# Altium schematic symbol library aeronist-Schematic-Lib.SchLib: 75 symbols (part 1 of 2)
Pins are listed as number, name and electrical type; pins without a type are passive.

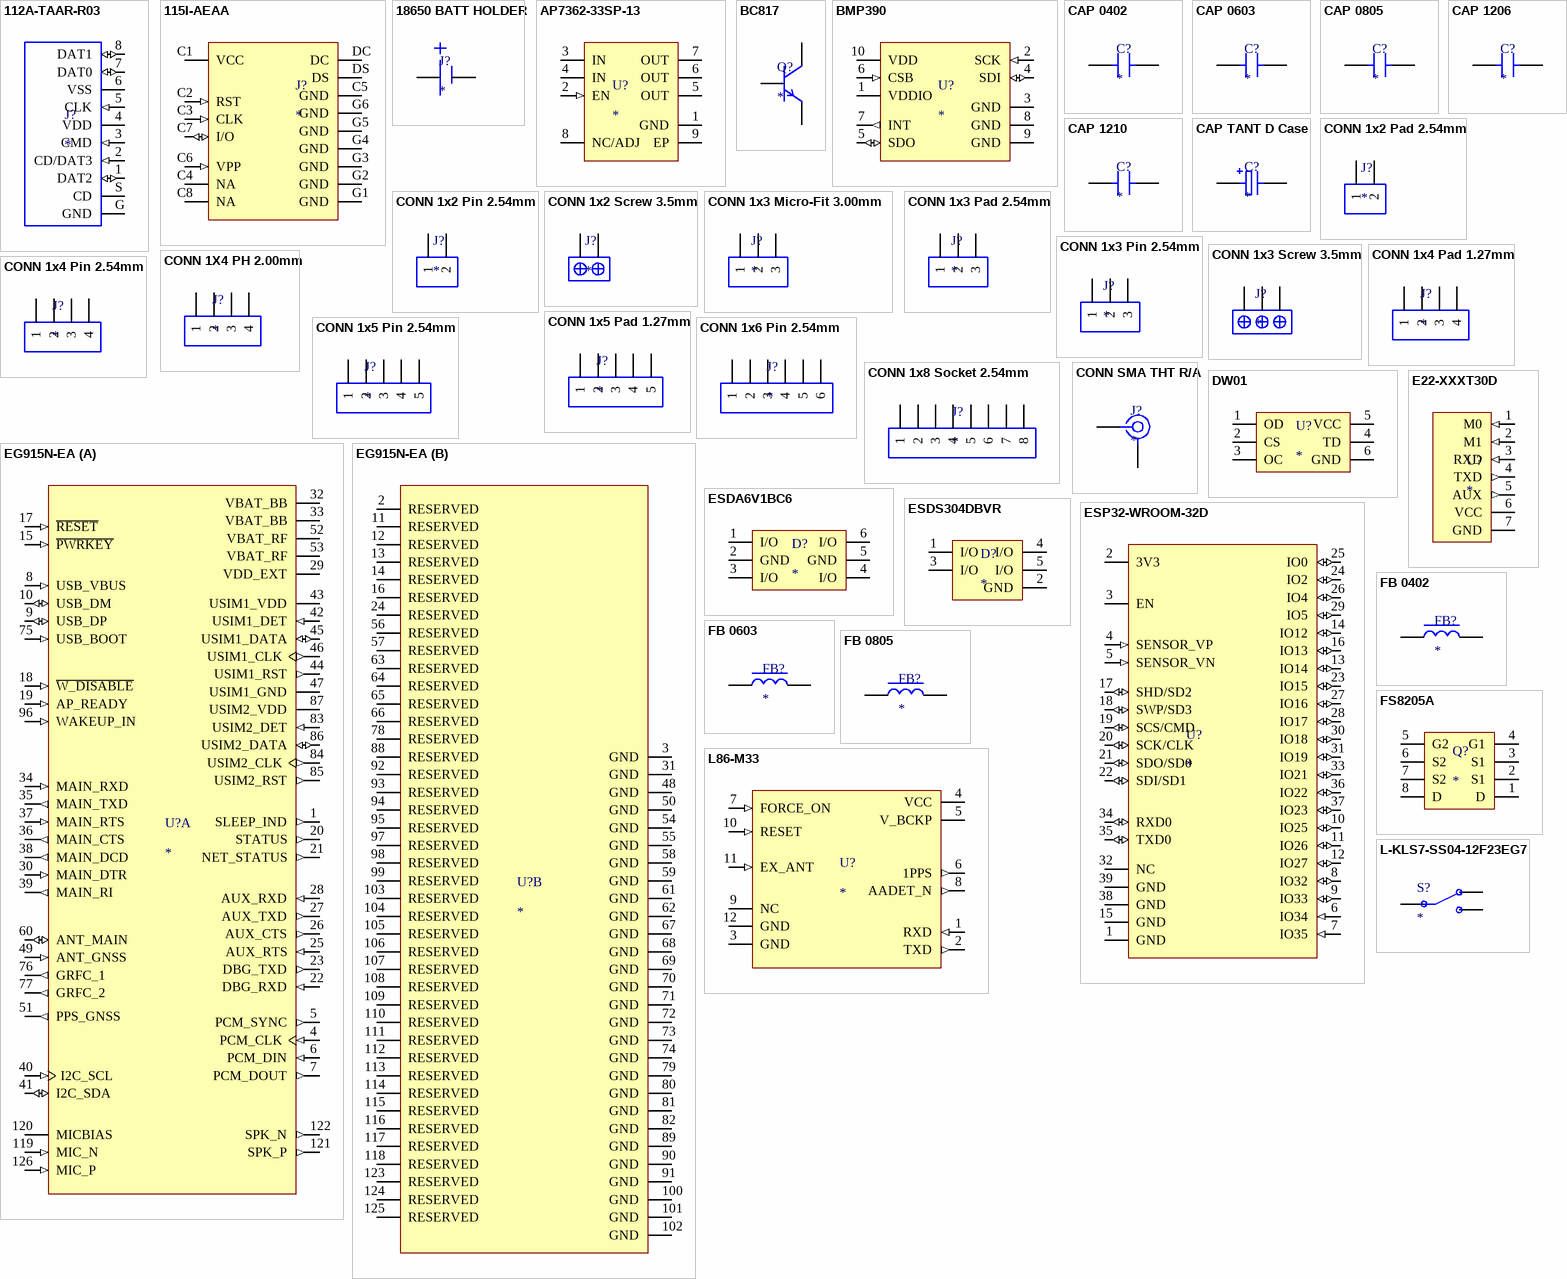
[diagram p0: symbols 112A-TAAR-R03 to L-KLS7-SS04-12F23EG7]

## 112A-TAAR-R03
designator J?
Connector, microSD push-push SMT, right-angle, with card detection switch.
footprint 112A-TAAR-R03 (Right-angle microSD SMT, 9 pins (8 data + detection), card eject switch, 1.83 mm height.)
pins: 1 DAT2 (io), 2 CD/DAT3 (in), 3 CMD (in), 4 VDD (power), 5 CLK (in), 6 VSS (power), 7 DAT0 (io), 8 DAT1 (io), G GND (power), S CD (power)

## 115I-AEAA
designator J?
115I-AEAA Connector Micro SIM Card Push-Pull 6P SMD Card Edge Connectors
footprint 115I-AEAA (6-pin right-angle SMD push-push Micro SIM card socket with gold-plated contacts)
pins: C1 VCC (power), C2 RST (in), C3 CLK (in), C4 NA, C5 GND (power), C6 VPP (in), C7 I/O (io), C8 NA, DC, DS, G1 GND (power), G2 GND (power), G3 GND (power), G4 GND (power), G5 GND (power), G6 GND (power)

## 18650 BATT HOLDER
designator J?
SMD battery holder contact snap-in clip  for unpolarized 18650 cell connection.
footprint 18650 BATT HOLDER (Footprint for 18650 Li-Ion battery holder snap-in contact, suitable for unpolarized 18650 cells.)
pins: N - (power), P + (power)

## AP7362-33SP-13
designator U?
Ldo, Fixed, 3.3V, 1.5A, -40 To 85Deg C Rohs Compliant: Yes |Diodes Inc. AP7362-33SP-13; Accuracy: 3.5%; Max Supply Voltage: 5.5V; Max Junction Temperature (Tj): 125°C; Min Input Voltage: 2.2V; Number of Channels: 1; Polarity: Positive; Quiescent Current: 25nA; Supplier: Avnet; Supplier Part Number: AP7362-33SP-13; Manufacturer: Diodes Inc.; Manufacturer Part Number: AP7362-33SP-13; RoHS: Compliant; Category: LDO Voltage Regulators; Stock: 157500; Pricing: 2500=0,13818, 5000=0,13748, 10000=0,13677, 15000=0,13607, 20000=0,13536 (USD); Case/Package: SOP; China RoHS: Compliant; Contact Plating: Tin; Height - Seated (Max): 1.75mm; Length: 4.9mm; Lifecycle Status: Production; Max Operating Temperature: 85°C; Max Output current: 1.5A; Min Operating Temperature: -40°C; Mounting Technology: Surface Mount; Number of Circuits: 1; Number of Outputs: 1; Pins: 8; Number of Regulators: 1; Number of Terminals: 8; Output Current: 1.5A; Output Type: Fixed; Output Voltage: 3.3V; REACH SVHC: Yes; Schedule B: 8542390000, 8542390000|8542390000|8542390000|8542390000|8542390000; Terminal Pitch: 1.27mm; Width: 3.9mm; ComponentLink1URL: https://datasheet.octopart.com:443/AP7362-33SP-13-Diodes-Inc.-datasheet-141402624.pdf?src-supplier=IHS; ComponentLink1Description: https://datasheet.octopart.com:443/AP7362-33SP-13-Diodes-Inc.-datasheet-141402624.pdf?src-supplier=IHS; ComponentLink2URL: https://datasheet.octopart.com:443/AP7362-33SP-13-Diodes-Inc.-datasheet-145012332.pdf?src-supplier=SHENGYU+ELECTRONICS; ComponentLink2Description: https://datasheet.octopart.com:443/AP7362-33SP-13-Diodes-Inc.-datasheet-145012332.pdf?src-supplier=SHENGYU+ELECTRONICS
footprint SOP-8EP (SOP-8EP, 8-Leads, Body 4,90x3,85mm, Pitch 1,27mm, Thermal Pad 3,35x2,71mm, IPC Low Density)
pins: 1 GND (power), 2 EN (in), 3 IN (power), 4 IN (power), 5 OUT (power), 6 OUT (power), 7 OUT (power), 8 NC/ADJ, 9 EP

## BC817
designator Q?
Single Bipolar Transistor, NPN, 45 V, 500 mA, 345 mW, SOT-23 (TO-236AB), 3 Pins, Surface Mount; Manufacturer: Nexperia; Manufacturer Part Number: BC817-40,215; Manufacturer Lifecycle Status: RELEASED FOR SUPPLY; Collector Base Voltage (VCBO): 50V; Collector Emitter Breakdown Voltage: 45V; Collector Emitter Saturation Voltage: 700mV; Emitter Base Voltage (VEBO): 5V; hFE Min: 250; Max Collector Current: 500mA; Max Junction Temperature (Tj): 150°C; Max Power Dissipation: 250mW; Number of Elements: 1; Transition Frequency: 100MHz; Supplier: Farnell; Supplier Part Number: 2336780; RoHS: Compliant; Category: BJTs; Stock: 135000; Pricing: 3000=0,0333, 9000=0,0326 (EUR); Ambient Temperature Range High: 150°C; China RoHS: Compliant; Collector Emitter Voltage (VCEO): 45V; Contact Plating: Tin; Height: 1.1mm; Lifecycle Status: Production; Max Operating Temperature: 150°C; Min Operating Temperature: -65°C; Pins: 3; Number of Terminals: 3; Polarity: NPN; Power Dissipation: 250mW; REACH SVHC: Yes; Schedule B: 8541210080, 8541210080|8541210080, 8541210080|8541210080|8541210080, 8541210080|8541210080|8541210080|8541210080; ComponentLink1URL: https://sigma.octopart.com:443/138797052/technical_drawing/Nexperia-BC817-40%2C215.pdf?src-supplier=Upverter; ComponentLink1Description: https://sigma.octopart.com:443/138797052/technical_drawing/Nexperia-BC817-40%2C215.pdf?src-supplier=Upverter; ComponentLink2URL: https://datasheet.octopart.com:443/BC817-40%2C215-Nexperia-datasheet-83187975.pdf?src-supplier=Newark; ComponentLink2Description: https://datasheet.octopart.com:443/BC817-40%2C215-Nexperia-datasheet-83187975.pdf?src-supplier=Newark; ComponentLink3URL: https://datasheet.octopart.com:443/BC817-40%2C215-Nexperia-datasheet-8514921.pdf?src-supplier=Newark; ComponentLink3Description: https://datasheet.octopart.com:443/BC817-40%2C215-Nexperia-datasheet-8514921.pdf?src-supplier=Newark; ComponentLink4URL: https://datasheet.octopart.com:443/BC817-40%2C215-Nexperia-datasheet-108335331.pdf?src-supplier=Burklin+Elektronik; ComponentLink4Description: https://datasheet.octopart.com:443/BC817-40%2C215-Nexperia-datasheet-108335331.pdf?src-supplier=Burklin+Elektronik; ComponentLink5URL: https://datasheet.octopart.com:443/BC817-40%2C215-NXP-Semiconductors-datasheet-180936575.pdf?src-supplier=IHS; ComponentLink5Description: https://datasheet.octopart.com:443/BC817-40%2C215-NXP-Semiconductors-datasheet-180936575.pdf?src-supplier=IHS; ComponentLink6URL: https://datasheet.octopart.com:443/BC817-40%2C215-Nexperia-datasheet-78862085.pdf?src-supplier=Farnell; ComponentLink6Description: https://datasheet.octopart.com:443/BC817-40%2C215-Nexperia-datasheet-78862085.pdf?src-supplier=Farnell; ComponentLink7URL: https://datasheet.octopart.com:443/BC817-40.215-Philips-datasheet-118926.pdf?src-supplier=Farnell; ComponentLink7Description: https://datasheet.octopart.com:443/BC817-40.215-Philips-datasheet-118926.pdf?src-supplier=Farnell; ComponentLink8URL: https://datasheet.octopart.com:443/BC817-40.215-Philips-datasheet-88079.pdf?src-supplier=Farnell; ComponentLink8Description: https://datasheet.octopart.com:443/BC817-40.215-Philips-datasheet-88079.pdf?src-supplier=Farnell; ComponentLink9URL: https://datasheet.octopart.com:443/BC817-40.215-Philips-datasheet-128977.pdf?src-supplier=Farnell; ComponentLink9Description: https://datasheet.octopart.com:443/BC817-40.215-Philips-datasheet-128977.pdf?src-supplier=Farnell; ComponentLink10URL: https://datasheet.octopart.com:443/BC817-40.215-Philips-datasheet-29749.pdf?src-supplier=Future+Electronics; ComponentLink10Description: https://datasheet.octopart.com:443/BC817-40.215-Philips-datasheet-29749.pdf?src-supplier=Future+Electronics; ComponentLink11URL: https://datasheet.octopart.com:443/BC817-40.215-Philips-datasheet-10632440.pdf?src-supplier=element14+APAC; ComponentLink11Description: https://datasheet.octopart.com:443/BC817-40.215-Philips-datasheet-10632440.pdf?src-supplier=element14+APAC; ComponentLink12URL: https://datasheet.octopart.com:443/BC817-40%2C215-Philips-datasheet-14064526.pdf?src-supplier=iiiC; ComponentLink12Description: https://datasheet.octopart.com:443/BC817-40%2C215-Philips-datasheet-14064526.pdf?src-supplier=iiiC; ComponentLink13URL: http://sigma.octopart.com:80/rohs_statement/NXP-Semiconductors-company-12.pdf?src-supplier=Compliance+Statements; ComponentLink13Description: http://sigma.octopart.com:80/rohs_statement/NXP-Semiconductors-company-12.pdf?src-supplier=Compliance+Statements; ComponentLink14URL: http://sigma.octopart.com:80/reach_statement/NXP-Semiconductors-company-13.pdf?src-supplier=Compliance+Statements; ComponentLink14Description: http://sigma.octopart.com:80/reach_statement/NXP-Semiconductors-company-13.pdf?src-supplier=Compliance+Statements
footprint SOT23-3 (SOT23, 3-Leads, Body 2,90x2,30mm, Pitch 0,95mm, IPC Low Density)
pins: 1 B, 2 E, 3 C

## BMP390
designator U?
Pressure sensor, 300-1250hPa, 2.0*2.0*0.75mm, I2C/SPI; Manufacturer: Bosch Sensortec; Manufacturer Part Number: BMP390; Supplier: Future Electronics; Supplier Part Number: 3151950; RoHS: Compliant; Category: Pressure Sensors; Stock: 106; Pricing: 1=3,29, 20=3,01, 150=2,83, 1000=2,65, 5000=2,5 (USD); ComponentLink1URL: https://datasheet.octopart.com:443/BMP390-Bosch-Sensortec-datasheet-164327956.pdf?src-supplier=Future+Electronics; ComponentLink1Description: https://datasheet.octopart.com:443/BMP390-Bosch-Sensortec-datasheet-164327956.pdf?src-supplier=Future+Electronics
footprint BMP390 (LGA-10 footprint for Bosch BMP390 barometric pressure sensor, 2.0 × 2.0 × 0.75 mm package, 0.5 mm pitch)
pins: 1 VDDIO (power), 2 SCK (in), 3 GND (power), 4 SDI (io), 5 SDO (io), 6 CSB (in), 7 INT (out), 8 GND (power), 9 GND (power), 10 VDD (power)

## CAP 0402
designator C?
Capacitor SMD 0402
footprint CAP 0402 (Chip Capacitor, 2-Leads, Body 2,00x1,25mm, IPC Low Density)
pins: 1, 2

## CAP 0603
designator C?
Capacitor SMD 0603
footprint CAP 0603 (Chip Capacitor, 2-Leads, Body 1,60x0,80mm, IPC Low Density)
pins: 1, 2

## CAP 0805
designator C?
Capacitor SMD 0805
footprint CAP 0805 (Chip Capacitor, 2-Leads, Body 2,00x1,25mm, IPC Low Density)
pins: 1, 2

## CAP 1206
designator C?
Capacitor SMD 0603
footprint CAP 1206 (Chip Capacitor, 2-Leads, Body 3,20x1,60mm, IPC Low Density)
pins: 1, 2

## CAP 1210
designator C?
Capacitor SMD 1210
footprint CAP 1210 (Chip Capacitor, 2-Leads, Body 3,20x2,50mm, IPC Low Density)
pins: 1, 2

## CAP TANT D Case
designator C?
Capacitor Tantalum SMD D Case
footprint CAP TANT D Case
pins: 1, 2

## CONN 1x2 Pad 2.54mm
designator J?
1×2 pad connector, 2.54 mm pitch.
footprint CONN 1x2 PAD 2.54mm (1×2 pad connector, 2.54 mm pitch.)
pins: 1, 2

## CONN 1x2 Pin 2.54mm
designator J?
1×2 pin header connector, 2.54 mm pitch, through-hole.
footprint CONN 1x2 PIN 2.54mm (1×2 pin header connector, 2.54 mm pitch, through-hole.)
pins: 1, 2

## CONN 1x2 Screw 3.5mm
designator J?
1×2 screw terminal connector, 3.5 mm pitch, through-hole.
footprint CONN 1X2 SCREW 3.5MM (1×2 screw terminal connector, 3.5 mm pitch, through-hole.)
pins: 1, 2

## CONN 1x3 Micro-Fit 3.00mm
designator J?
1×2 Micro Fit type connector, 3.0 mm pitch, surface-mount.
footprint CONN 1X3 MICRO-FIT 3.00MM
pins: 1, 2, 3

## CONN 1x3 Pad 2.54mm
designator J?
1×3 pad connector, 2.54 mm pitch.
footprint CONN 1x3 PAD 2.54mm (1×3 pad connector, 2.54 mm pitch.)
pins: 1, 2, 3

## CONN 1x3 Pin 2.54mm
designator J?
1×3 pin header connector, 2.54 mm pitch, through-hole.
footprint CONN 1x3 PIN 2.54mm (1×3 pin header connector, 2.54 mm pitch, through-hole.)
pins: 1, 2, 3

## CONN 1x3 Screw 3.5mm
designator J?
1×3 screw terminal connector, 3.5 mm pitch, through-hole.
footprint CONN 1X3 SCREW 3.5MM (1×3 screw terminal connector, 3.5 mm pitch, through-hole.)
pins: 1, 2, 3

## CONN 1x4 Pad 1.27mm
designator J?
1×4 pin header connector, 1.27 mm pitch.
footprint CONN 1x4 PAD 1.27mm (1×4 pad connector, 1.27 mm pitch.)
pins: 1, 2, 3, 4

## CONN 1X4 PH 2.00mm
designator J?
Connector Header, PH Series, 4 Position, Side Entry, 2.00mm, Solder, Surface Mount, Natural.; Manufacturer: JST; Manufacturer Part Number: S4B-PH-SM4-TB(LF)(SN); Connector Type: Male Pin; Contact Resistance: 20mΩ; Current Rating: 2A; Dielectric Material: Polyamide; Gender: Male; Insulation Resistance: 1GΩ; Max Voltage Rating (AC): 100V; Number of Contacts: 4; Pitch: 2mm; Supplier: Future Electronics; Supplier Part Number: 1769371; RoHS: Compliant; Category: Headers and Wire Housings; Stock: 5000; Pricing: 1000=0,32, 3000=0,315, 5000=0,31 (USD); China RoHS: Compliant; Color: White; Contact Gender: Male; Contact Material: Tin; Contact Mating Length: 3.302mm; Contact Plating: Tin; Depth: 7.6mm; Fastening Type: Detent; Flammability Rating: UL94 V-0; Height: 5.5mm; Housing Color: Natural; Housing Material: Nylon; Lead Free: Lead Free; Lead Pitch: 2mm; Length: 6.096mm; Lifecycle Status: Production; Max Current Rating: 2A; Max Operating Temperature: 85°C; Max Voltage Rating (DC): 100V; Min Operating Temperature: -25°C; Mounting Technology: Surface Mount; Pins: 4; Number of Poles: 4; Number of Positions: 4; Number of Rows: 1; Packaging: Cut Tape; REACH SVHC: Yes; Schedule B: 8536694040; Terminal Pitch: 2mm; Termination: Solder; Voltage Rating: 100V; Voltage Rating (AC): 100V; Voltage Rating (DC): 100V; Weight: 28.349523g; Width: 5mm; Working Voltage: 100V; ComponentLink1URL: https://datasheet.octopart.com:443/S4B-PH-SM4-TB%28LF%29%28SN%29-JST-datasheet-147762421.pdf?src-supplier=Upverter; ComponentLink1Description: https://datasheet.octopart.com:443/S4B-PH-SM4-TB%28LF%29%28SN%29-JST-datasheet-147762421.pdf?src-supplier=Upverter; ComponentLink2URL: https://datasheet.octopart.com:443/S4B-PH-SM4-TB%28LF%29%28SN%29-JST-datasheet-10411123.pdf?src-supplier=Upverter; ComponentLink2Description: https://datasheet.octopart.com:443/S4B-PH-SM4-TB%28LF%29%28SN%29-JST-datasheet-10411123.pdf?src-supplier=Upverter; ComponentLink3URL: https://datasheet.octopart.com:443/S4B-PH-SM4-TB%28LF%29%28SN%29-JST-datasheet-8324864.pdf?src-supplier=Upverter; ComponentLink3Description: https://datasheet.octopart.com:443/S4B-PH-SM4-TB%28LF%29%28SN%29-JST-datasheet-8324864.pdf?src-supplier=Upverter; ComponentLink4URL: https://datasheet.octopart.com:443/S4B-PH-SM4-TB%28LF%29%28SN%29-JST-datasheet-180491729.pdf?src-supplier=IHS; ComponentLink4Description: https://datasheet.octopart.com:443/S4B-PH-SM4-TB%28LF%29%28SN%29-JST-datasheet-180491729.pdf?src-supplier=IHS; ComponentLink5URL: https://datasheet.octopart.com:443/S4B-PH-SM4-TB%28LF%29%28SN%29-JST-datasheet-15068535.pdf?src-supplier=SOS+electronic; ComponentLink5Description: https://datasheet.octopart.com:443/S4B-PH-SM4-TB%28LF%29%28SN%29-JST-datasheet-15068535.pdf?src-supplier=SOS+electronic; ComponentLink6URL: https://datasheet.octopart.com:443/S4B-PH-SM4-TB-%28LF%29%28SN%29-JST-datasheet-165061721.pdf?src-supplier=Burklin+Elektronik; ComponentLink6Description: https://datasheet.octopart.com:443/S4B-PH-SM4-TB-%28LF%29%28SN%29-JST-datasheet-165061721.pdf?src-supplier=Burklin+Elektronik; ComponentLink7URL: https://datasheet.octopart.com:443/S4B-PH-SM4-TB-%28LF%29%28SN%29-JST-datasheet-12510261.pdf?src-supplier=TME; ComponentLink7Description: https://datasheet.octopart.com:443/S4B-PH-SM4-TB-%28LF%29%28SN%29-JST-datasheet-12510261.pdf?src-supplier=TME; ComponentLink8URL: https://datasheet.octopart.com:443/S4B-PH-SM4-TB%28LF%29%28SN%29-JST-datasheet-56537.pdf?src-supplier=DigiKey; ComponentLink8Description: https://datasheet.octopart.com:443/S4B-PH-SM4-TB%28LF%29%28SN%29-JST-datasheet-56537.pdf?src-supplier=DigiKey; ComponentLink9URL: https://datasheet.octopart.com:443/S4B-PH-SM4-TB-%28LF%29-%28SN%29-JST-datasheet-159515011.pdf?src-supplier=Amar+Radio+Corporation; ComponentLink9Description: https://datasheet.octopart.com:443/S4B-PH-SM4-TB-%28LF%29-%28SN%29-JST-datasheet-159515011.pdf?src-supplier=Amar+Radio+Corporation
footprint CONN 1X4 PH 2.00MM (Connector Header, Surface Mount (SMT), Right Angle (Side Entry), 4 Positions, 2.00mm Pitch, JST PH Series)
pins: 1, 2, 3, 4

## CONN 1x4 Pin 2.54mm
designator J?
1×4 pin header connector, 2.54 mm pitch, through-hole.
footprint CONN 1x4 PIN 2.54mm (1×4 pin header connector, 2.54 mm pitch, through-hole.)
pins: 1, 2, 3, 4

## CONN 1x5 Pad 1.27mm
designator J?
1×5 pin header connector, 1.27 mm pitch.
footprint CONN 1x5 PAD 1.27mm (1×3 pad connector, 1.27 mm pitch.)
pins: 1, 2, 3, 4, 5

## CONN 1x5 Pin 2.54mm
designator J?
1×5 pin header connector, 2.54 mm pitch, through-hole.
footprint CONN 1x5 PIN 2.54mm (1×5 pin header connector, 2.54 mm pitch, through-hole.)
pins: 1, 2, 3, 4, 5

## CONN 1x6 Pin 2.54mm
designator J?
1×6 pin header connector, 2.54 mm pitch, through-hole.
footprint CONN 1x6 PIN 2.54mm (1×6 pin header connector, 2.54 mm pitch, through-hole.)
pins: 1, 2, 3, 4, 5, 6

## CONN 1x8 Socket 2.54mm
designator J?
1×8 pin header connector, 2.54 mm pitch, through-hole.
footprint CONN 1x8 SOCKET 2.54mm (1×8 female pin header, 2.54 mm pitch, through-hole.)
pins: 1, 2, 3, 4, 5, 6, 7, 8

## CONN SMA THT R/A
designator J?
RF SMA Connector, 1 Contact(s), Board Mount, R/A
footprint CONN SMA THT R/A (Through-hole PCB footprint for right-angle SMA connector)
pins: 1, 2 (power)

## DW01
designator U?
Li-Ion battery protection IC DW01 providing overcharge, overdischarge, and overcurrent protection.
footprint SOT-23-6 (SOP-8, 8-Leads, Body 4.90x3.90mm, Pitch 1.27mm, IPC Low Density.)
pins: 1 OD, 2 CS, 3 OC, 4 TD, 5 VCC (power), 6 GND (power)

## E22-XXXT30D
designator U?
E22-XXXT30D LoRa RF module, 400/900 MHz, 30 dBm TX power, UART interface, 3.3–5.5 V supply.
footprint E22-XXXT30D (Through-hole PCB footprint for E22 series LoRa RF modules)
pins: 1 M0 (in), 2 M1 (in), 3 RXD (in), 4 TXD (out), 5 AUX (out), 6 VCC (power), 7 GND (power)

## EG915N-EA
designator U?
Cellular, Navigation BeiDou, EDGE, Galileo, GLONASS, GNSS, GPRS, GPS, GSM, HSPA+, LTE, UMTS, WCDMA Transceiver Module 915MHz Antenna Not Included Surface Mount; MF: Quectel; MP: EG915NEAAC-N05-SNNSA; SnapEDA_Link: https://www.snapeda.com/parts/EG915NEAAC-N05-SNNSA/Quectel/view-part/?ref=snap; Package: None; Value: *; Check_prices: https://www.snapeda.com/parts/EG915NEAAC-N05-SNNSA/Quectel/view-part/?ref=eda
footprint EG915N (LGA-126 footprint for Quectel EG915N series, 1.1 mm pitch, 33 × 29)
part A pins: 1 SLEEP_IND (out), 4 PCM_CLK (in), 5 PCM_SYNC (out), 6 PCM_DIN (in), 7 PCM_DOUT (out), 8 USB_VBUS (in), 9 USB_DP (io), 10 USB_DM (io), 15 ~{PWRKEY} (in), 17 ~{RESET} (in), 18 ~{W_DISABLE} (in), 19 AP_READY (in), 20 STATUS (out), 21 NET_STATUS (out), 22 DBG_RXD (in), 23 DBG_TXD (out), 25 AUX_RTS (in), 26 AUX_CTS (out), 27 AUX_TXD (out), 28 AUX_RXD (in), 29 VDD_EXT (power), 30 MAIN_DTR (in), 32 VBAT_BB (power), 33 VBAT_BB (power), 34 MAIN_RXD (in), 35 MAIN_TXD (out), 36 MAIN_CTS (out), 37 MAIN_RTS (in), 38 MAIN_DCD (out), 39 MAIN_RI (out), 40 I2C_SCL (in), 41 I2C_SDA (io), 42 USIM1_DET (in), 43 USIM1_VDD (power), 44 USIM1_RST (out), 45 USIM1_DATA (io), 46 USIM1_CLK (out), 47 USIM1_GND (power), 49 ANT_GNSS (in), 51 PPS_GNSS (out), 52 VBAT_RF (power), 53 VBAT_RF (power), 60 ANT_MAIN (io), 75 USB_BOOT (in), 76 GRFC_1 (out), 77 GRFC_2 (out), 83 USIM2_DET (in), 84 USIM2_CLK (out), 85 USIM2_RST (out), 86 USIM2_DATA (io), 87 USIM2_VDD (power), 96 WAKEUP_IN (in), 119 MIC_N (in), 120 MICBIAS (power), 121 SPK_P (out), 122 SPK_N (out), 126 MIC_P (in)
part B pins: 2 RESERVED, 3 GND (power), 11 RESERVED, 12 RESERVED, 13 RESERVED, 14 RESERVED, 16 RESERVED, 24 RESERVED, 31 GND (power), 48 GND (power), 50 GND (power), 54 GND (power), 55 GND (power), 56 RESERVED, 57 RESERVED, 58 GND (power), 59 GND (power), 61 GND (power), 62 GND (power), 63 RESERVED, 64 RESERVED, 65 RESERVED, 66 RESERVED, 67 GND (power), 68 GND (power), 69 GND (power), 70 GND (power), 71 GND (power), 72 GND (power), 73 GND (power), 74 GND (power), 78 RESERVED, 79 GND (power), 80 GND (power), 81 GND (power), 82 GND (power), 88 RESERVED, 89 GND (power), 90 GND (power), 91 GND (power), 92 RESERVED, 93 RESERVED, 94 RESERVED, 95 RESERVED, 97 RESERVED, 98 RESERVED, 99 RESERVED, 100 GND (power), 101 GND (power), 102 GND (power), 103 RESERVED, 104 RESERVED, 105 RESERVED, 106 RESERVED, 107 RESERVED, 108 RESERVED, 109 RESERVED, 110 RESERVED, 111 RESERVED, 112 RESERVED, 113 RESERVED, 114 RESERVED, 115 RESERVED, 116 RESERVED, 117 RESERVED, 118 RESERVED, 123 RESERVED, 124 RESERVED, 125 RESERVED

## ESDA6V1BC6
designator D?
ESDA Series 4 Channel 6.1 V 20 pF SMT Bi-Directional Transil Array - SOT-23-6L; Manufacturer: STMicroelectronics; Manufacturer Part Number: ESDA6V1BC6; Breakdown Voltage: 7.05V; Value: 20pF; Clamping Voltage: 11.35V; Direction: Bidirectional; ESD Protection: Yes; Leakage Current: 1µA; Max Breakdown Voltage: 8V; Max Junction Temperature (Tj): 150°C; Max Power Dissipation: 80W; Max Repetitive Reverse Voltage (Vrrm): 5V; Min Breakdown Voltage: 6.1V; Number of Bidirectional Channels: 4; Peak Pulse Current: 3A; Power Line Protection: No; Test Current: 1mA; Supplier: Farnell; Supplier Part Number: 2353644; RoHS: Compliant; Category: TVS Diodes; Stock: 66279; Pricing: 5=0,368, 50=0,194, 100=0,179, 500=0,163, 1500=0,148 (EUR); Case/Package: SOT-23; China RoHS: Compliant; Composition: Zener; Depth: 1.75mm; Height: 1.45mm; Lead Free: Lead Free; Length: 3.05mm; Lifecycle Status: Production; Max Operating Temperature: 150°C; Max Reverse Leakage Current: 1µA; Min Operating Temperature: -40°C; Mounting Technology: Surface Mount; Number of Channels: 4; Number of Elements: 4; Pins: 6; Number of Terminals: 6; Operating Supply Voltage: 5V; Peak Pulse Power: 80W; Peak Reverse Current: 1µA; Polarity: Bidirectional; Power Rating: 80W; Radiation Hardening: No; REACH SVHC: Yes; Reverse Breakdown Voltage: 6.1V; Reverse Standoff Voltage: 5V; Schedule B: 8536300000, 8536300000|8536300000|8536300000|8536300000|8536300000; Termination: SMD/SMT; Voltage Rating (DC): 6.1V; Width: 1.75mm; Working Voltage: 5V; ComponentLink1URL: https://datasheet.octopart.com:443/ESDA6V1BC6-STMicroelectronics-datasheet-62332559.pdf?src-supplier=TME; ComponentLink1Description: https://datasheet.octopart.com:443/ESDA6V1BC6-STMicroelectronics-datasheet-62332559.pdf?src-supplier=TME; ComponentLink2URL: https://datasheet.octopart.com:443/ESDA6V1BC6-STMicroelectronics-datasheet-23376.pdf?src-supplier=Components+Direct; ComponentLink2Description: https://datasheet.octopart.com:443/ESDA6V1BC6-STMicroelectronics-datasheet-23376.pdf?src-supplier=Components+Direct; ComponentLink3URL: https://datasheet.octopart.com:443/ESDA6V1BC6-STMicroelectronics-datasheet-158727008.pdf?src-supplier=Newchip+Electronics+Limited; ComponentLink3Description: https://datasheet.octopart.com:443/ESDA6V1BC6-STMicroelectronics-datasheet-158727008.pdf?src-supplier=Newchip+Electronics+Limited; ComponentLink4URL: https://datasheet.octopart.com:443/ESDA6V1BC6-STMicroelectronics-datasheet-14049101.pdf?src-supplier=iiiC; ComponentLink4Description: https://datasheet.octopart.com:443/ESDA6V1BC6-STMicroelectronics-datasheet-14049101.pdf?src-supplier=iiiC
footprint SOT-23-6 (SOP-8, 8-Leads, Body 4.90x3.90mm, Pitch 1.27mm, IPC Low Density.)
pins: 1 I/O, 2 GND, 3 I/O, 4 I/O, 5 GND, 6 I/O

## ESDS304DBVR
designator D?
Trans Voltage Suppressor Diode, 85W, 3.6V V(RWM), Unidirectional, 4 Element, Silicon; Manufacturer: Texas Instruments; Manufacturer Part Number: ESDS304DBVR; Supplier: Mouser; Supplier Part Number: 595-ESDS304DBVR; RoHS: Yes; Category: TVS Diodes; Stock: 132; Pricing: 1=0,45, 10=0,304, 50=0,304, 100=0,282, 1000=0,202, 10000=0,15 (USD); Terminal Finish: Tin; JESD-609 Code: e3; Diode Type: TRANS VOLTAGE SUPPRESSOR; Moisture Sensitivity Level: 1; Reach SVHC Compliant: Yes; RoHS Compliant: Yes; ComponentLink1URL: https://www.ti.com:443/lit/ds/symlink/esds302.pdf?src-supplier=IHS+Markit; ComponentLink1Description: https://www.ti.com:443/lit/ds/symlink/esds302.pdf?src-supplier=IHS+Markit; ComponentLink2URL: http://www.ti.com/lit/ds/symlink/esds302.pdf?src-supplier=Digikey; ComponentLink2Description: http://www.ti.com/lit/ds/symlink/esds302.pdf?src-supplier=Digikey
footprint SOT23-5 (SOT23, 5-Leads, Body 2,90x2,80mm, Pitch 0,95mm, IPC Low Density)
pins: 1 I/O, 2 GND, 3 I/O, 4 I/O, 5 I/O

## ESP32-WROOM-32D
designator U?
Dual-core Wi-Fi + Bluetooth module with 4 MB flash. 2.4 GHz connectivity, 34 GPIOs, UART/SPI/I²C, ADC/DAC, 3.3 V supply; Manufacturer: Espressif Systems; Manufacturer Part Number: ESP32-WROOM-32D(4MB); Supplier: Mouser; Supplier Part Number: 356-ESP32WROOM32D4MB; RoHS: No; Category: LDO
footprint ESP32-WROOM-32 (Module size: 18.0 × 25.5 × 3.1 mm. Pin pitch: 1.27 mm, 38 castellated pads. Antenna keepout zone required (minimum 15 mm clearance).)
pins: 1 GND (power), 2 3V3 (power), 3 EN, 4 SENSOR_VP (in), 5 SENSOR_VN (in), 6 IO34 (in), 7 IO35 (in), 8 IO32 (io), 9 IO33 (io), 10 IO25 (io), 11 IO26 (io), 12 IO27 (io), 13 IO14 (io), 14 IO12 (io), 15 GND (power), 16 IO13 (io), 17 SHD/SD2 (io), 18 SWP/SD3 (io), 19 SCS/CMD (io), 20 SCK/CLK (io), 21 SDO/SD0 (io), 22 SDI/SD1 (io), 23 IO15 (io), 24 IO2 (io), 25 IO0 (io), 26 IO4 (io), 27 IO16 (io), 28 IO17 (io), 29 IO5 (io), 30 IO18 (io), 31 IO19 (io), 32 NC, 33 IO21 (io), 34 RXD0 (io), 35 TXD0 (io), 36 IO22 (io), 37 IO23 (io), 38 GND (power), 39 GND (power)

## FB 0402
designator FB?
Ferrite Bead SMD 0402
footprint FB 0402 (Chip Ferrite, 2-Leads, Body 1,00x0,50mm, IPC Low Density)
pins: 1, 2

## FB 0603
designator FB?
Ferrite Bead SMD 0603
footprint FB 0603 (Chip Ferrite, 2-Leads, Body 1,60x0,80mm, IPC Low Density)
pins: 1, 2

## FB 0805
designator FB?
Ferrite Bead SMD 0805
footprint FB 0805 (Chip Ferrite, 2-Leads, Body 2,00x1,25mm, IPC Low Density)
pins: 1, 2

## FS8205A
designator Q?
Dual N-channel MOSFET IC (FS8205A) with integrated back-to-back configuration for load switching and protection applications.
footprint TSSOP-8 (TSSOP, 8-Leads, Body 2,93x4,40mm, Pitch 0,65mm, IPC Low Density)
pins: 1 D, 2 S1, 3 S1, 4 G1, 5 G2, 6 S2, 7 S2, 8 D

## L86-M33
designator U?
GNSS Module, Galileo, GLONASS, GPS, QZSS, 1.57542GHz, 1.60171GHz, -167 dBm, 35 s, 3V to 4.3V; Manufacturer: Quectel; Manufacturer Part Number: L86-M33; Number of Circuits: 1; Operating Supply Voltage: 3.3V; Supplier: Mouser; Supplier Part Number: 277-L86-M33; RoHS: Compliant; Category: RF Transceiver Modules and Modems; Stock: 1427; Pricing: 1=12,82, 10=11,15, 50=10,56, 100=9,77, 1000=8,75, 10000=8,75 (USD); Height - Seated (Max): 7.15mm; Length: 18.4mm; Max Operating Temperature: 85°C; Min Operating Temperature: -40°C; Number of Terminals: 12; REACH SVHC: Yes; Width: 18.4mm; ComponentLink1URL: https://datasheet.octopart.com:443/L86-M33-Quectel-datasheet-181153375.pdf?src-supplier=IHS; ComponentLink1Description: https://datasheet.octopart.com:443/L86-M33-Quectel-datasheet-181153375.pdf?src-supplier=IHS; ComponentLink2URL: https://datasheet.octopart.com:443/L86-M33-Quectel-datasheet-163887215.pdf?src-supplier=SOS+electronic; ComponentLink2Description: https://datasheet.octopart.com:443/L86-M33-Quectel-datasheet-163887215.pdf?src-supplier=SOS+electronic; ComponentLink3URL: https://datasheet.octopart.com/L86-M33-Quectel-datasheet-77840748.pdf; ComponentLink3Description: https://datasheet.octopart.com/L86-M33-Quectel-datasheet-77840748.pdf
footprint L86-M33 (Footprint for Quectel L86-M33 GNSS module, 16 × 16 mm outline, 1.1 mm pad pitch, castellated edge pad)
pins: 1 RXD (in), 2 TXD (out), 3 GND (power), 4 VCC (power), 5 V_BCKP (power), 6 1PPS (out), 7 FORCE_ON (in), 8 AADET_N (out), 9 NC, 10 RESET (in), 11 EX_ANT (in), 12 GND (power)

## L-KLS7-SS04-12F23EG7
designator S?
On-On slide switch SPDT, through-hole, right angle.
footprint L-KLS7-SS04-12F23EG7 (Slide switch SPDT (ON-ON), through-hole, 3 pins, right-angle type.)
pins: 1 NC, 2 C, 3 NO

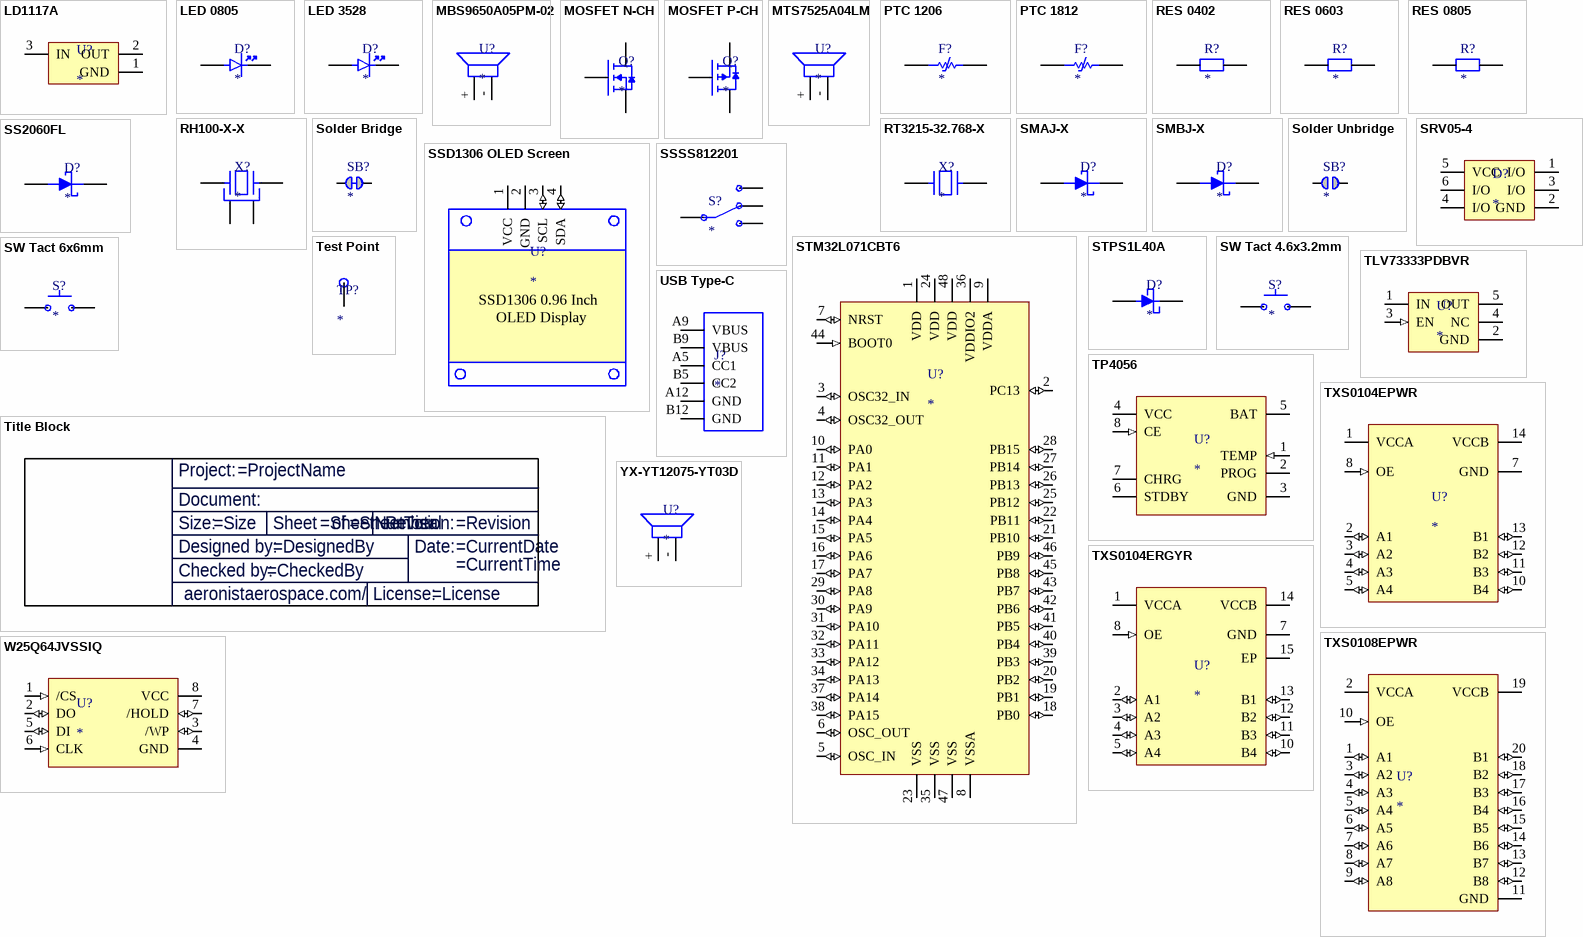
[diagram p1: symbols LD1117A to YX-YT12075-YT03D]

## LD1117A
designator U?
LD1117A Series 1 A Fixed Output Positive Voltage LDO Regulator - SOT-223; Manufacturer: STMicroelectronics; Manufacturer Part Number: LD1117AS33TR; Accuracy: 2%; Dropout Voltage: 1.15V; Input Bias Current: 5mA; Max Supply Voltage: 10V; Max Junction Temperature (Tj): 125°C; Max Output current: 1.2A; Max Power Dissipation: 12W; Min Input Voltage: 4.75V; Min Output Voltage: 3.3V; Number of Channels: 1; Output Current: 1A; Supplier: Farnell; Supplier Part Number: 1467776; RoHS: Compliant; Category: LDO Voltage Regulators; Stock: 25047; Pricing: 5=0,647, 50=0,41, 100=0,358, 500=0,318, 1000=0,307 (EUR); Case/Package: SOT-223; China RoHS: Compliant; Contact Plating: Tin; Height: 1.8mm; Height - Seated (Max): 1.9mm; Lead Free: Lead Free; Length: 6.5mm; Lifecycle Status: Production; Max Operating Temperature: 125°C; Min Operating Temperature: 0°C; Mounting Technology: Surface Mount; Nominal Output Voltage: 3.3V; Number of Circuits: 1; Number of Outputs: 1; Number of Regulators: 1; Number of Terminals: 4; Output Type: Fixed; Output Voltage: 3.3V; Output Voltage Accuracy: 2%; Packaging: Tape and Reel; Polarity: Positive; Power Dissipation: 12W; Quiescent Current: 5mA; Radiation Hardening: No; REACH SVHC: Yes; Schedule B: 8542390000, 8542390000|8542390000|8542390000|8542390000|8542390000; Terminal Pitch: 2.3mm; Voltage Tolerance: 2%; Weight: 4.535924g; Width: 3.5mm; ComponentLink1URL: https://datasheet.octopart.com:443/LD1117AS33TR-STMicroelectronics-datasheet-20828903.pdf?src-supplier=Augswan; ComponentLink1Description: https://datasheet.octopart.com:443/LD1117AS33TR-STMicroelectronics-datasheet-20828903.pdf?src-supplier=Augswan; ComponentLink2URL: https://datasheet.octopart.com:443/LD1117AS33TR-STMicroelectronics-datasheet-10620727.pdf?src-supplier=Upverter; ComponentLink2Description: https://datasheet.octopart.com:443/LD1117AS33TR-STMicroelectronics-datasheet-10620727.pdf?src-supplier=Upverter; ComponentLink3URL: https://datasheet.octopart.com:443/LD1117AS33TR-STMicroelectronics-datasheet-12519863.pdf?src-supplier=Upverter; ComponentLink3Description: https://datasheet.octopart.com:443/LD1117AS33TR-STMicroelectronics-datasheet-12519863.pdf?src-supplier=Upverter; ComponentLink4URL: https://datasheet.octopart.com:443/LD1117AS33TR-STMicroelectronics-datasheet-10414043.pdf?src-supplier=Upverter; ComponentLink4Description: https://datasheet.octopart.com:443/LD1117AS33TR-STMicroelectronics-datasheet-10414043.pdf?src-supplier=Upverter; ComponentLink5URL: https://datasheet.octopart.com:443/LD1117AS33TR-STMicroelectronics-datasheet-8082942.pdf?src-supplier=Farnell; ComponentLink5Description: https://datasheet.octopart.com:443/LD1117AS33TR-STMicroelectronics-datasheet-8082942.pdf?src-supplier=Farnell; ComponentLink6URL: https://datasheet.octopart.com:443/LD1117AS33TR-STMicroelectronics-datasheet-21631343.pdf?src-supplier=Farnell; ComponentLink6Description: https://datasheet.octopart.com:443/LD1117AS33TR-STMicroelectronics-datasheet-21631343.pdf?src-supplier=Farnell; ComponentLink7URL: https://datasheet.octopart.com:443/LD1117AS33TR-STMicroelectronics-datasheet-8775481.pdf?src-supplier=Nu+Horizons; ComponentLink7Description: https://datasheet.octopart.com:443/LD1117AS33TR-STMicroelectronics-datasheet-8775481.pdf?src-supplier=Nu+Horizons; ComponentLink8URL: https://datasheet.octopart.com:443/LD1117AS33TR-STMicroelectronics-datasheet-109520.pdf?src-supplier=Nu+Horizons; ComponentLink8Description: https://datasheet.octopart.com:443/LD1117AS33TR-STMicroelectronics-datasheet-109520.pdf?src-supplier=Nu+Horizons; ComponentLink9URL: https://datasheet.octopart.com:443/LD1117AS33TR-STMicroelectronics-datasheet-5337082.pdf?src-supplier=element14; ComponentLink9Description: https://datasheet.octopart.com:443/LD1117AS33TR-STMicroelectronics-datasheet-5337082.pdf?src-supplier=element14; ComponentLink10URL: https://datasheet.octopart.com:443/LD1117AS33TR-STMicroelectronics-datasheet-11062.pdf?src-supplier=DigiKey; ComponentLink10Description: https://datasheet.octopart.com:443/LD1117AS33TR-STMicroelectronics-datasheet-11062.pdf?src-supplier=DigiKey; ComponentLink11URL: https://datasheet.octopart.com:443/LD1117AS33TR-STMicroelectronics-datasheet-39139415.pdf?src-supplier=element14+APAC; ComponentLink11Description: https://datasheet.octopart.com:443/LD1117AS33TR-STMicroelectronics-datasheet-39139415.pdf?src-supplier=element14+APAC; ComponentLink12URL: https://datasheet.octopart.com:443/LD1117AS33TR-STMicroelectronics-datasheet-14169714.pdf?src-supplier=iiiC; ComponentLink12Description: https://datasheet.octopart.com:443/LD1117AS33TR-STMicroelectronics-datasheet-14169714.pdf?src-supplier=iiiC
footprint SOT-223 (SOT223, 4-Leads, Body 6,50x7,00mm (avg), Pitch 2,30mm, IPC Low Density)
pins: 1 GND (power), 2 OUT (power), 3 IN (power)

## LED 0805
designator D?
LED 0805 SMD
footprint LED 0805 (Chip LED, 2-Leads, Body 2,00x1,25mm, IPC Low Density)
pins: A, K

## LED 3528
designator D?
LED 3528 SMD
footprint LED 3528 (Chip LED, 2-Leads, Body 3,50x2,80mm, IPC Low Density)
pins: A, K

## MBS9650A05PM-02
designator U?
9.6 mm x 9.6mm magnetic active buzzer, SMT, 5 V (4–7 V), 2.7 kHz, 83 dB.
footprint MBS9650A05PM-02
pins: +, -

## MOSFET N-CH
designator Q?
SOT-23-3 package, N-Channel MOSFET
footprint SOT23-3 (SOT23, 3-Leads, Body 2,90x2,30mm, Pitch 0,95mm, IPC Low Density)
pins: 1 G, 2 S, 3 D

## MOSFET P-CH
designator Q?
SOT-23-3 package, P-Channel MOSFET
footprint SOT23-3 (SOT23, 3-Leads, Body 2,90x2,30mm, Pitch 0,95mm, IPC Low Density)
pins: 1 G, 2 S, 3 D

## MTS7525A04LM
designator U?
7.5 x 7.5 mm magnetic passive buzzer, SMT, 3.6 V (2.5–4.5 V), 2.7 kHz, 85 dB.
footprint MTS7525A04LM
pins: +, -

## PTC 1206
designator F?
PTC Resettable Fuse; Manufacturer: Bel; Manufacturer Part Number: 0ZCG0075FF2C; Max Current Rating: 100A; Hold Current: 750mA; Trip Current: 1.5A; Time to Trip: 200ms; Supplier 1: Arrow Electronics; RoHS: Yes; Category: PTC Resettable Fuses; Stock 1: 4661; Pricing 1: 2000=0,0751, 4000=0,0699, 6000=0,065, 10000=0,0604 (USD); Mount: Surface Mount; Case/Package: 1812; Case Code (Metric): 4532; Case Code (Imperial): 1812; Contact Plating: Tin,Matte; Min Operating Temperature: -40°C; Max Operating Temperature: 85°C; Packaging: Cut Tape; Series: 0ZCG; Lead Free: Lead Free; RoHS Compliant: Yes; ComponentLink1URL: https://datasheet.ciiva.com/18550/0zcg-18550523.pdf?src-supplier=Digi-Key; ComponentLink1Description: https://datasheet.ciiva.com/18550/0zcg-18550523.pdf?src-supplier=Digi-Key; ComponentLink2URL: https://datasheet.ciiva.com/18550/0zcg-18550524.pdf?src-supplier=Digi-Key; ComponentLink2Description: https://datasheet.ciiva.com/18550/0zcg-18550524.pdf?src-supplier=Digi-Key; ComponentLink3URL: https://datasheet.ciiva.com/18550/0zcg-18550767.pdf?src-supplier=Digi-Key; ComponentLink3Description: https://datasheet.ciiva.com/18550/0zcg-18550767.pdf?src-supplier=Digi-Key
footprint PTC 1206 (Chip PTC, 2-Leads, Body 3,25x1,65mm, IPC Low Density)
pins: 1, 2

## PTC 1812
designator F?
PTC Resettable Fuse; Manufacturer: Bel; Manufacturer Part Number: 0ZCG0075FF2C; Max Current Rating: 100A; Hold Current: 750mA; Trip Current: 1.5A; Time to Trip: 200ms; Supplier 1: Arrow Electronics; RoHS: Yes; Category: PTC Resettable Fuses; Stock 1: 4661; Pricing 1: 2000=0,0751, 4000=0,0699, 6000=0,065, 10000=0,0604 (USD); Mount: Surface Mount; Case/Package: 1812; Case Code (Metric): 4532; Case Code (Imperial): 1812; Contact Plating: Tin,Matte; Min Operating Temperature: -40°C; Max Operating Temperature: 85°C; Packaging: Cut Tape; Series: 0ZCG; Lead Free: Lead Free; RoHS Compliant: Yes; ComponentLink1URL: https://datasheet.ciiva.com/18550/0zcg-18550523.pdf?src-supplier=Digi-Key; ComponentLink1Description: https://datasheet.ciiva.com/18550/0zcg-18550523.pdf?src-supplier=Digi-Key; ComponentLink2URL: https://datasheet.ciiva.com/18550/0zcg-18550524.pdf?src-supplier=Digi-Key; ComponentLink2Description: https://datasheet.ciiva.com/18550/0zcg-18550524.pdf?src-supplier=Digi-Key; ComponentLink3URL: https://datasheet.ciiva.com/18550/0zcg-18550767.pdf?src-supplier=Digi-Key; ComponentLink3Description: https://datasheet.ciiva.com/18550/0zcg-18550767.pdf?src-supplier=Digi-Key
footprint PTC 1812 (Chip PTC, 2-Leads, Body 4,55x3,24mm, IPC Low Density)
pins: 1, 2

## RES 0402
designator R?
Resistor SMD 0402
footprint RES 0402 (Chip Resistor, 2-Leads, Body 1,00x0,50mm, IPC Low Density)
pins: 1, 2

## RES 0603
designator R?
Resistor SMD 0603
footprint RES 0603 (Chip Resistor, 2-Leads, Body 1,60x0,80mm, IPC Low Density)
pins: 1, 2

## RES 0805
designator R?
Resistor SMD 0805
footprint RES 0805 (Chip Resistor, 2-Leads, Body 2,00x1,25mm, IPC Low Density)
pins: 1, 2

## RH100-X-X
designator X?
RH100 Series Crystal, X Mhz, X pF, Smd, 3.2Mm X 2.5Mm Raltron
footprint RH100 (Footprint for RH100 series crystal oscillator 4-pin 8.0×3.8 mm)
pins: 1, 2 GND, 3, 4 GND

## RT3215-32.768-X
designator X?
Parallel - Fundamental Quartz Crystal, 0.032768MHz Nom; Manufacturer: Raltron Electronics; Manufacturer Part Number: RT3215-32.768-12.5-TR; Manufacturer Lifecycle Status: ACTIVE; Value: 12.5pF; Frequency: 32.768kHz; Frequency Stability: 144ppm; Frequency Tolerance: 0.002%; ESR: 70kΩ; Supplier: Arrow Electronics; Supplier Part Number: RT3215-32.768-12.5-TR; RoHS: Compliant; Category: Crystals; Stock: 108000; Pricing: 3000=0,2828, 6000=0,28, 9000=0,276, 15000=0,188, 21000=0,154, 30000=0,152 (USD); China RoHS: Compliant; Lead Free: Lead Free; Lifecycle Status: Production; Load Capacitance: 12.5pF; Max Operating Temperature: 85°C; Min Operating Temperature: -40°C; Mounting Technology: Surface Mount; REACH SVHC: Yes; Schedule B: 8541600080, 8541600080|8541600080|8541600080|8541600080|8541600080; Tolerance: 0.002%; ComponentLink1URL: https://datasheet.octopart.com:443/RT3215-32.768-12.5-TR-Raltron-Electronics-datasheet-181182521.pdf?src-supplier=IHS; ComponentLink1Description: https://datasheet.octopart.com:443/RT3215-32.768-12.5-TR-Raltron-Electronics-datasheet-181182521.pdf?src-supplier=IHS; ComponentLink2URL: https://datasheet.octopart.com:443/RT3215-32.768-12.5-TR-Raltron-Electronics-datasheet-140255155.pdf?src-supplier=Raltron+Electronics; ComponentLink2Description: https://datasheet.octopart.com:443/RT3215-32.768-12.5-TR-Raltron-Electronics-datasheet-140255155.pdf?src-supplier=Raltron+Electronics; ComponentLink3URL: https://datasheet.octopart.com:443/RT3215-32.768-12.5-TR-Raltron-Electronics-datasheet-137126748.pdf?src-supplier=Future+Electronics; ComponentLink3Description: https://datasheet.octopart.com:443/RT3215-32.768-12.5-TR-Raltron-Electronics-datasheet-137126748.pdf?src-supplier=Future+Electronics; ComponentLink4URL: https://datasheet.octopart.com:443/RT3215-32.768-12.5-TR-Raltron-Electronics-datasheet-82614827.pdf?src-supplier=Future+Electronics; ComponentLink4Description: https://datasheet.octopart.com:443/RT3215-32.768-12.5-TR-Raltron-Electronics-datasheet-82614827.pdf?src-supplier=Future+Electronics; ComponentLink5URL: https://datasheet.octopart.com:443/RT3215-32.768-12.5-TR-Raltron-Electronics-datasheet-62112304.pdf?src-supplier=Future+Electronics; ComponentLink5Description: https://datasheet.octopart.com:443/RT3215-32.768-12.5-TR-Raltron-Electronics-datasheet-62112304.pdf?src-supplier=Future+Electronics; ComponentLink6URL: https://datasheet.octopart.com:443/RT3215-32.768-12.5-TR-Raltron-Electronics-datasheet-12522443.pdf?src-supplier=Future+Electronics; ComponentLink6Description: https://datasheet.octopart.com:443/RT3215-32.768-12.5-TR-Raltron-Electronics-datasheet-12522443.pdf?src-supplier=Future+Electronics
footprint RT3215-32.768-X (32.768 kHz ±20ppm Crystal 12.5pF 70 kOhms 2-SMD, No Lead)
pins: 1, 2

## SMAJ-X
designator D?
SMAJ Series SMT Bi/Uni-Directional Transient Voltage Suppressor - SMA
footprint SMA (SMA, 2-Leads, Body 4,28x2,58mm, IPC Low Density)
pins: 1, 2

## SMBJ-X
designator D?
SMBJ Series SMT Bi/Uni-Directional Transient Voltage Suppressor - SMB
footprint SMB (SMB, 2-Leads, Body 4,31x3,62mm, IPC Low Density)
pins: 1, 2

## Solder Bridge
designator SB?
Bridged PCB jumper
footprint SOLDER BRIDGE (Bridged PCB jumper footprint)
pins: 1, 2

## Solder Unbridge
designator SB?
Unbridged PCB jumper
footprint SOLDER UNBRIDGE (Unbridged PCB jumper footprint)
pins: 1, 2

## SRV05-4
designator D?
SRV Series 17.5 V 3 pF SMT RailClamp® Low Capacitance TVS Diode Array SOT-23-6; Manufacturer: Semtech; Manufacturer Part Number: SRV05-4.TCT; Breakdown Voltage: 6V; Value: 5pF; Clamping Voltage: 12.5V; Current: 5A; Direction: Unidirectional; ESD Protection: Yes; Leakage Current: 5µA; Max Power Dissipation: 300W; Number of Bidirectional Channels: 4; Number of Elements: 1; Operating Supply Voltage: 5V; Peak Pulse Current: 12A; Test Current: 1mA; Supplier: Arrow Electronics; Supplier Part Number: SRV05-4.TCT; RoHS: Compliant; Category: TVS Diodes; Stock: 1665000; Pricing: 3000=0,3492 (USD); Case/Package: SOT-23; China RoHS: Compliant; Depth: 1.6mm; Height: 1.15mm; Lead Free: Lead Free; Length: 2.9mm; Lifecycle Status: Production; Max Breakdown Voltage: 6V; Max Operating Temperature: 125°C; Max Reverse Leakage Current: 5µA; Min Breakdown Voltage: 6V; Min Operating Temperature: -55°C; Mounting Technology: Surface Mount; Number of Channels: 4; Pins: 6; Number of Terminals: 6; Packaging: Cut Tape; Peak Pulse Power: 300W; Polarity: Unidirectional; Power Line Protection: Yes; Power Rating: 300W; Radiation Hardening: No; REACH SVHC: Yes; Reverse Breakdown Voltage: 6V; Reverse Standoff Voltage: 5V; Schedule B: 8542390000, 8542390000|8542390000|8542390000|8542390000|8542390000; Voltage: 5V; Voltage Rating (DC): 5V; Width: 1.6mm; Working Voltage: 5V; ComponentLink1URL: https://datasheet.octopart.com:443/SRV05-4.TCT-Semtech-datasheet-33008608.pdf?src-supplier=IHS; ComponentLink1Description: https://datasheet.octopart.com:443/SRV05-4.TCT-Semtech-datasheet-33008608.pdf?src-supplier=IHS; ComponentLink2URL: https://datasheet.octopart.com:443/SRV05-4.TCT-Semtech-datasheet-604703.pdf?src-supplier=Arrow+Electronics; ComponentLink2Description: https://datasheet.octopart.com:443/SRV05-4.TCT-Semtech-datasheet-604703.pdf?src-supplier=Arrow+Electronics; ComponentLink3URL: https://datasheet.octopart.com:443/SRV05-4.TCT-Semtech-datasheet-41194810.pdf?src-supplier=TME; ComponentLink3Description: https://datasheet.octopart.com:443/SRV05-4.TCT-Semtech-datasheet-41194810.pdf?src-supplier=TME; ComponentLink4URL: https://datasheet.octopart.com:443/SRV05-4.TCT-Semtech-datasheet-10542293.pdf?src-supplier=Farnell; ComponentLink4Description: https://datasheet.octopart.com:443/SRV05-4.TCT-Semtech-datasheet-10542293.pdf?src-supplier=Farnell; ComponentLink5URL: https://datasheet.octopart.com:443/SRV05-4.TCT-Semtech-datasheet-14048601.pdf?src-supplier=iiiC; ComponentLink5Description: https://datasheet.octopart.com:443/SRV05-4.TCT-Semtech-datasheet-14048601.pdf?src-supplier=iiiC
footprint SOT-23-6 (SOP-8, 8-Leads, Body 4.90x3.90mm, Pitch 1.27mm, IPC Low Density.)
pins: 1 I/O, 2 GND (power), 3 I/O, 4 I/O, 5 VCC (power), 6 I/O

## SS2060FL
designator D?
Rectifier Diode, Schottky, 1 Phase, 1 Element, 2A, 60V V(RRM), Silicon; Manufacturer: Panjit; Manufacturer Part Number: SS2060FL_R1_00001; Element Configuration: Single; Forward Voltage: 700mV; Max Forward Surge Current (Ifsm): 50A; Number of Elements: 1; Peak Reverse Current: 40µA; Supplier: Mouser; Supplier Part Number: 241-SS2060FLR100001; RoHS: Compliant; Category: Rectifier Diodes; Stock: 5102; Pricing: 1=0,36, 10=0,232, 50=0,232, 100=0,161, 1000=0,107, 10000=0,067 (USD); Lifecycle Status: Production; Max Operating Temperature: 150°C; Max Output current: 2A; Max Repetitive Reverse Voltage (Vrrm): 60V; Min Operating Temperature: -50°C; Mounting Technology: Surface Mount; Pins: 2; Number of Terminals: 2; Peak Non-Repetitive Surge Current: 50A; Radiation Hardening: No; REACH SVHC: No; Reverse Standoff Voltage: 60V; ComponentLink1URL: https://datasheet.octopart.com:443/SS2060FL_R1_00001-Panjit-datasheet-151294498.pdf?src-supplier=IHS; ComponentLink1Description: https://datasheet.octopart.com:443/SS2060FL_R1_00001-Panjit-datasheet-151294498.pdf?src-supplier=IHS; ComponentLink2URL: https://datasheet.octopart.com:443/SS2060FL_R1_00001-Panjit-datasheet-180983485.pdf?src-supplier=IHS; ComponentLink2Description: https://datasheet.octopart.com:443/SS2060FL_R1_00001-Panjit-datasheet-180983485.pdf?src-supplier=IHS
footprint SOD-123FL (SOD-123FL, 2-Leads, Body 1,80x3,60mm, IPC Low Density)
pins: 1, 2

## SSD1306 OLED Screen
designator U?
0.96" 128×64 blue OLED display (SSD1306, I²C, 4-pin, 3.3–5 V).
footprint SSD1306 OLED Display (0.96" 128×64 blue OLED module with SSD1306 controller, I²C interface (4-pin), 3.3–5 V compatible.)
pins: 1 VCC (power), 2 GND (power), 3 SCL (io), 4 SDA (io)
text: SSD1306 0.96 Inch; OLED Display

## SSSS812201
designator S?
Slide Switch / Switch Slide SP3T Side Slide 0.3A 5VDC 10000Cycles Gull Wing SMD T/R; Manufacturer: ALPS; Manufacturer Part Number: SSSS812201; Actuator Length: 1.4986mm; Contact Current Rating: 300mA; Contact Resistance: 70mΩ; Electrical Life: 10kcycles; Illumination Type: Non-Illuminated; Insulation Resistance: 100MΩ; Max Voltage Rating (DC): 4V; Number of Positions: 3; Operating Force: 2N; Voltage Rating (DC): 5V; Supplier: Mouser; Supplier Part Number: 688-SSSS812201; RoHS: Compliant; Category: Slide Switches; Stock: 3543; Pricing: 1=1,77, 10=1,6, 50=1,47, 100=1,34, 1000=0,852, 10000=0,851 (USD); Current Rating: 300mA; Depth: 5mm; Export Control Classification Number (ECCN) Code: EAR99; Height: 1.4mm; Harmonized Tariff Schedule (HTS) Code: 8536.50.90.50; Introduction Date: 2010-02-04; Length: 9.7mm; Lifecycle Status: Production; Max Current Rating: 300mA; Max Operating Temperature: 85°C; Mechanical Life: 10kcycles; Min Operating Temperature: -40°C; Mounting Technology: Surface Mount; Pins: 3; Orientation: Right Angle; Radiation Hardening: No; Termination: Gull Wing; Throw Configuration: SP3T; ComponentLink1URL: https://datasheet.octopart.com:443/SSSS812201-ALPS-datasheet-182235029.pdf?src-supplier=IHS; ComponentLink1Description: https://datasheet.octopart.com:443/SSSS812201-ALPS-datasheet-182235029.pdf?src-supplier=IHS; ComponentLink2URL: https://datasheet.octopart.com:443/SSSS812201-ALPS-datasheet-182235643.pdf?src-supplier=IHS; ComponentLink2Description: https://datasheet.octopart.com:443/SSSS812201-ALPS-datasheet-182235643.pdf?src-supplier=IHS; ComponentLink3URL: https://datasheet.octopart.com:443/SSSS812201-ALPS-datasheet-154726925.pdf?src-supplier=Electro+Sonic; ComponentLink3Description: https://datasheet.octopart.com:443/SSSS812201-ALPS-datasheet-154726925.pdf?src-supplier=Electro+Sonic; ComponentLink4URL: https://datasheet.octopart.com:443/SSSS812201-ALPS-datasheet-41175121.pdf?src-supplier=Electro+Sonic; ComponentLink4Description: https://datasheet.octopart.com:443/SSSS812201-ALPS-datasheet-41175121.pdf?src-supplier=Electro+Sonic; ComponentLink5URL: https://datasheet.octopart.com:443/SSSS812201-ALPS-datasheet-37145305.pdf?src-supplier=Electro+Sonic; ComponentLink5Description: https://datasheet.octopart.com:443/SSSS812201-ALPS-datasheet-37145305.pdf?src-supplier=Electro+Sonic; ComponentLink6URL: https://datasheet.octopart.com:443/SSSS812201-ALPS-datasheet-140497758.pdf?src-supplier=TME; ComponentLink6Description: https://datasheet.octopart.com:443/SSSS812201-ALPS-datasheet-140497758.pdf?src-supplier=TME
footprint SSSS812201 (Switch, Slide, SPDT (1P2T), 0.1A 12V, Surface Mount, Right Angle (Side Actuated), ALPS SSSS8 Series)
pins: 1 NO, 2 NC, 3 C, 4 NO

## STM32L071CBT6
designator U?
MCU 32-Bit Ultra Low Power STM32L ARM Cortex M0+ RISC 128kB Flash 48-Pin LQFP Tray; Manufacturer: STMicroelectronics; Manufacturer Part Number: STM32L071CBT6; Core Architecture: ARM Cortex-M0+; Data Bus Width: 32b; EEPROM Memory Size: 6kB; Frequency: 32MHz; Interface: I2S; Max Junction Temperature (Tj): 105°C; Max Power Dissipation: 370mW; Max Supply Voltage: 3.6V; Min Supply Voltage: 1.65V; Nominal Supply Current: 290nA; Number of A/D Converters: 1; Number of ADC Channels: 13; Number of Channels: 10; Number of I2C Channels: 2; Number of I/Os: 37; Number of PWM Channels: 4; Number of Timers/Counters: 8; Operating Supply Voltage: 3V; Peripherals: POR; RAM Size: 20kB; Watchdog Timer: Yes; Supplier: Farnell; Supplier Part Number: 2518142; RoHS: Compliant; Category: Microcontrollers; Stock: 10105; Pricing: 1=3,31, 10=2,59, 25=2,41, 50=2,29, 100=2,07, 250=1,97, 500=1,9, 1000=1,74 (EUR); Ambient Temperature Range High: 85°C; Case/Package: LQFP; China RoHS: Compliant; Flash Memory Size: 128kB; Height: 1.6mm; Height - Seated (Max): 1.6mm; Lead Free: Lead Free; Length: 7mm; Lifecycle Status: Production; Clock Frequency: 32MHz; Max Operating Temperature: 85°C; Memory Size: 128kB; Memory Format: FLASH; Min Operating Temperature: -40°C; Mounting Technology: Surface Mount; Pins: 48; Number of Programmable I/O: 37; Number of SPI Channels: 2; Number of Terminals: 48; Number of UART Channels: 1; Number of USART Channels: 4; REACH SVHC: Yes; Schedule B: 8542310000; Terminal Pitch: 500µm; Width: 7mm; ComponentLink1URL: https://datasheet.octopart.com:443/STM32L071CBT6-STMicroelectronics-datasheet-137481386.pdf?src-supplier=IHS; ComponentLink1Description: https://datasheet.octopart.com:443/STM32L071CBT6-STMicroelectronics-datasheet-137481386.pdf?src-supplier=IHS; ComponentLink2URL: https://datasheet.octopart.com:443/STM32L071CBT6-STMicroelectronics-datasheet-113139635.pdf?src-supplier=ODG+(Origin+Data+Global); ComponentLink2Description: https://datasheet.octopart.com:443/STM32L071CBT6-STMicroelectronics-datasheet-113139635.pdf?src-supplier=ODG+(Origin+Data+Global); ComponentLink3URL: https://datasheet.octopart.com:443/STM32L071CBT6-STMicroelectronics-datasheet-62336796.pdf?src-supplier=SHENGYU+ELECTRONICS; ComponentLink3Description: https://datasheet.octopart.com:443/STM32L071CBT6-STMicroelectronics-datasheet-62336796.pdf?src-supplier=SHENGYU+ELECTRONICS; ComponentLink4URL: https://datasheet.octopart.com:443/STM32L071CBT6-STMicroelectronics-datasheet-49624918.pdf?src-supplier=Newark; ComponentLink4Description: https://datasheet.octopart.com:443/STM32L071CBT6-STMicroelectronics-datasheet-49624918.pdf?src-supplier=Newark
footprint LQFP48 (LQFP48, 48-Leads, Body 7x7mm, Pitch 0,5mm, IPC Low Density)
pins: 1 VDD (power), 2 PC13 (io), 3 OSC32_IN (io), 4 OSC32_OUT (io), 5 OSC_IN (io), 6 OSC_OUT (io), 7 NRST (io), 8 VSSA (power), 9 VDDA (power), 10 PA0 (io), 11 PA1 (io), 12 PA2 (io), 13 PA3 (io), 14 PA4 (io), 15 PA5 (io), 16 PA6 (io), 17 PA7 (io), 18 PB0 (io), 19 PB1 (io), 20 PB2 (io), 21 PB10 (io), 22 PB11 (io), 23 VSS (power), 24 VDD (power), 25 PB12 (io), 26 PB13 (io), 27 PB14 (io), 28 PB15 (io), 29 PA8 (io), 30 PA9 (io), 31 PA10 (io), 32 PA11 (io), 33 PA12 (io), 34 PA13 (io), 35 VSS (power), 36 VDDIO2 (power), 37 PA14 (io), 38 PA15 (io), 39 PB3 (io), 40 PB4 (io), 41 PB5 (io), 42 PB6 (io), 43 PB7 (io), 44 BOOT0 (in), 45 PB8 (io), 46 PB9 (io), 47 VSS (power), 48 VDD (power)